# Altium footprint library Components - 27.10.26 - 16.13.PcbLib: 1 footprints
Each footprint in its own frame and in the unit in brackets; x right, y up, seen from the top. Pads: shape width x height; smd on the part's side, far side on the other; paste and mask are expansions set on the pad; w line width, h text height; cw(c..) or ccw(c..) is an arc to the next point about the centre after c.
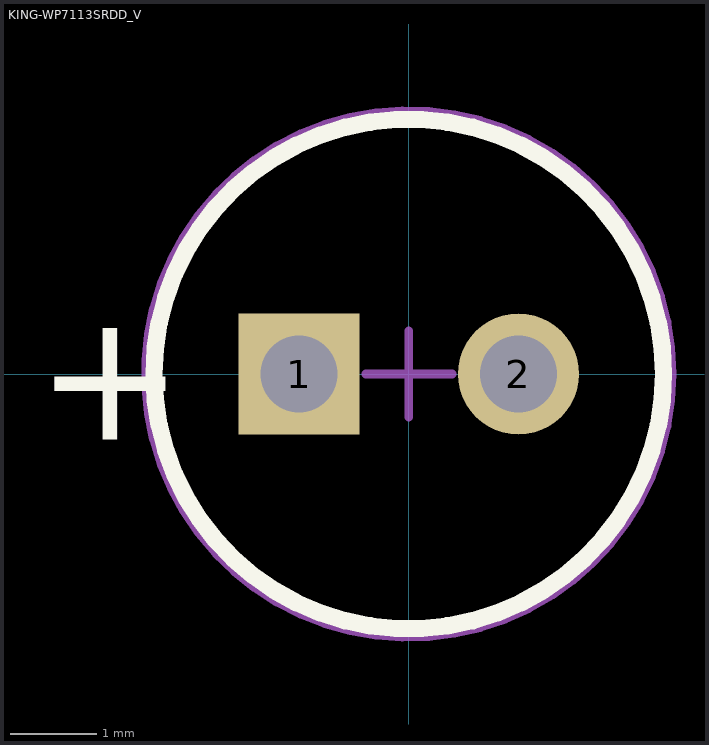
[diagram p0: the footprint, top view; thin cyan lines are the x and y axes]

## KING-WP7113SRDD_V [mm] "THD, 2-Leads, Dia 5.9mm, Body Length 8.6mm"
height 15.5
pads (2):
  rect 1.4x1.4 hole 0.889: 1(-1.27,0)
  round 1.4 hole 0.889: 2(1.27,0)
Top Overlay:
  circle w0.2: c0,0 r2.95
  text "+" at -4.318,-0.762 h1.5
Mechanical 13:
  circle w0.1: c0,0 r2.95
Mechanical 15:
  circle w0.1: c0,0 r3.05
  lines w0.1: -0.5,0 0.5,0 ; 0,-0.5 0,0.5
3D body "WP7113.STEP": height 15.5, standoff -20.1, extent -2.95,-2.95 2.5,2.95